# Altium footprint library Module.PcbLib: 88 footprints (part 6 of 6)
Each footprint in its own frame and in the unit in brackets; x right, y up, seen from the top. Pads: shape width x height; smd on the part's side, far side on the other; paste and mask are expansions set on the pad; w line width, h text height; cw(c..) or ccw(c..) is an arc to the next point about the centre after c.
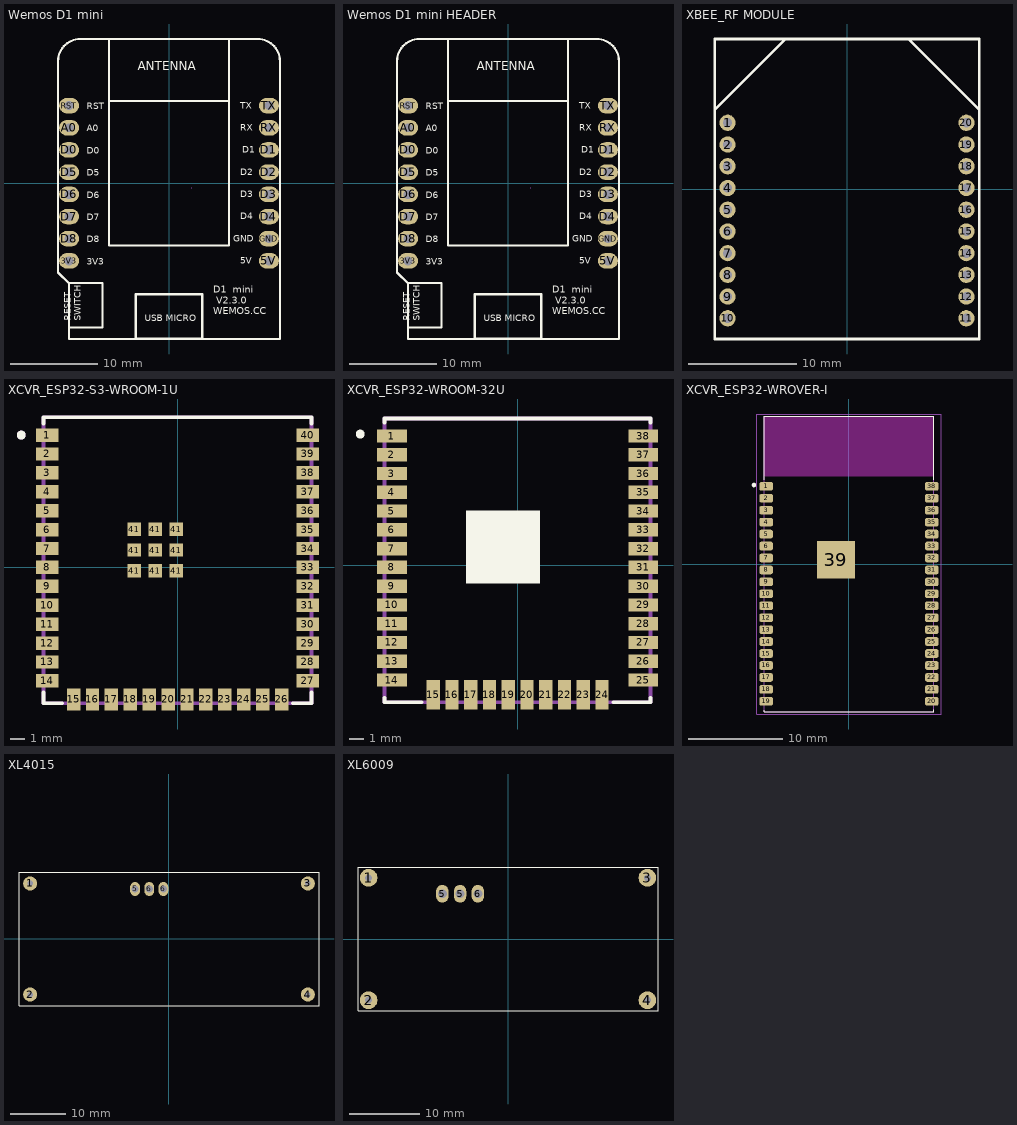
[diagram p5: the footprints below, top view; thin cyan lines are the x and y axes]

## Wemos D1 mini [mil]
pads (16):
  oval 90x70 hole 40: 3V3(-450,-350) 5V(450,-350) A0(-450,250) D0(-450,150) D1(450,150) D2(450,50) D3(450,-50) D4(450,-150) D5(-450,50) D6(-450,-50) D7(-450,-150) D8(-450,-250) GND(450,-250) RST(-450,350) RX(450,250) TX(450,350)
Top Overlay:
  lines w10: -500,548.2 -500,-401.8 -450,-451.8 -450,-701.8 500,-701.8 500,548.2 ; -500,550 cw(c-400,550) -400,650 400,650 cw(c400,550) 500,550 ; -270,650 -270,370 ; 270,650 270,370 ; -270,370 -270,-280 270,-280 270,370 ; -270,370 270,370 ; -450,-650 -300,-650 -300,-450 -450,-450 -450,-650 ; -150,-700 -150,-500 150,-500 150,-700 -150,-700
  text "RESET / SWITCH" at -398.58,-619.98 h30
  text "USB MICRO" at -110,-621.4 h30
  text "ANTENNA" at -140,508.2 h40
  text "TX" at 320,336.8 h30
  text "RX" at 320,236.8 h30
  text "D1" at 330,136.8 h30
  text "D2" at 320,36.8 h30
  text "D3" at 320,-63.2 h30
  text "D4" at 320,-163.2 h30
  text "GND" at 290,-263.2 h30
  text "5V" at 320,-363.2 h30
  text "3V3" at -370,-366.8 h30
  text "D8" at -370,-266.8 h30
  text "D7" at -370,-166.8 h30
  text "D6" at -370,-66.8 h30
  text "D5" at -370,33.2 h30
  text "D0" at -370,133.2 h30
  text "A0" at -370,233.2 h30
  text "RST" at -370,333.2 h30
  text "D1  mini /  V2.3.0 / WEMOS.CC" at 200,-590 h32
Top Designator:
  text ".Designator" at -146.1,-54.29 h60
Mechanical 15:
  lines w0.1: 101.6,-21.9 103.6,-19.9
3D body "User Library-WeMos.STEP": height 231.91, standoff -239.82, extent -500,-736.49 496.07,618.5

## Wemos D1 mini HEADER [mil]
pads (16):
  oval 90x70 hole 40: 3V3(-450,-350) 5V(450,-350) A0(-450,250) D0(-450,150) D1(450,150) D2(450,50) D3(450,-50) D4(450,-150) D5(-450,50) D6(-450,-50) D7(-450,-150) D8(-450,-250) GND(450,-250) RST(-450,350) RX(450,250) TX(450,350)
Top Overlay:
  lines w10: -500,548.2 -500,-401.8 -450,-451.8 -450,-701.8 500,-701.8 500,548.2 ; -500,550 cw(c-400,550) -400,650 400,650 cw(c400,550) 500,550 ; -270,650 -270,370 ; 270,650 270,370 ; -270,370 -270,-280 270,-280 270,370 ; -270,370 270,370 ; -450,-650 -300,-650 -300,-450 -450,-450 -450,-650 ; -150,-700 -150,-500 150,-500 150,-700 -150,-700
  text "RESET / SWITCH" at -398.58,-619.98 h30
  text "USB MICRO" at -110,-621.4 h30
  text "ANTENNA" at -140,508.2 h40
  text "TX" at 320,336.8 h30
  text "RX" at 320,236.8 h30
  text "D1" at 330,136.8 h30
  text "D2" at 320,36.8 h30
  text "D3" at 320,-63.2 h30
  text "D4" at 320,-163.2 h30
  text "GND" at 290,-263.2 h30
  text "5V" at 320,-363.2 h30
  text "3V3" at -370,-366.8 h30
  text "D8" at -370,-266.8 h30
  text "D7" at -370,-166.8 h30
  text "D6" at -370,-66.8 h30
  text "D5" at -370,33.2 h30
  text "D0" at -370,133.2 h30
  text "A0" at -370,233.2 h30
  text "RST" at -370,333.2 h30
  text "D1  mini /  V2.3.0 / WEMOS.CC" at 200,-590 h32
Top Designator:
  text ".Designator" at -146.1,-54.3 h60
Mechanical 15:
  lines w0.1: 101.6,-21.9 103.6,-19.9
3D body "User Library-WeMos.STEP": height 546.87, standoff 75.14, extent -502,-736.49 494.07,618.5
3D body "61300411821.stp": height 335.04, standoff -121.65, extent -499.22,-9.84 -400.79,409.85
3D body "61300411821.stp": height 335.04, standoff -121.65, extent 400.78,-9.84 499.21,409.85
3D body "61300411821.stp": height 335.04, standoff -121.65, extent 400.78,-409.84 499.21,9.85
3D body "61300411821.stp": height 335.04, standoff -121.65, extent -499.22,-409.84 -400.79,9.85

## XBEE_RF MODULE [mm]
pads (20):
  round 1.5 hole 0.85: 1(-10.998,6.096) 2(-10.998,4.095) 3(-10.998,2.094) 4(-10.998,0.093) 5(-10.998,-1.908) 6(-10.998,-3.909) 7(-10.998,-5.91) 8(-10.998,-7.911) 9(-10.998,-9.912) 10(-10.998,-11.913) 11(10.998,-11.913) 12(10.998,-9.912) 13(10.998,-7.911) 14(10.998,-5.91) 15(10.998,-3.909) 16(10.998,-1.908) 17(10.998,0.093) 18(10.998,2.094) 19(10.998,4.095) 20(10.998,6.096)
Top Overlay:
  lines w0.254: -12.192,7.29 -5.664,13.818 ; 5.664,13.818 12.192,7.29 ; -12.192,-13.818 -12.192,13.818 12.192,13.818 12.192,-13.818 -12.192,-13.818
Top Designator:
  text ".Designator" at -3.696,-0.372 h1.52
3D body "XBee Chip.STEP": height 12, standoff 4.5, extent -12.268,-14.001 12.232,13.899
3D body "61300211821.stp": height 11.61, standoff 0.01, extent -12.147,1.422 -9.647,7.002
3D body "61300211821.stp": height 11.61, standoff 0.01, extent -12.147,-2.58 -9.647,3
3D body "61300211821.stp": height 11.61, standoff 0.01, extent -12.147,-6.582 -9.647,-1.002
3D body "61300211821.stp": height 11.61, standoff 0.01, extent -12.147,-8.582 -9.647,-3.002
3D body "61300211821.stp": height 11.61, standoff 0.01, extent -12.147,-10.583 -9.647,-5.003
3D body "61300211821.stp": height 11.61, standoff 0.01, extent -12.147,-12.584 -9.647,-7.004
3D body "61300211821.stp": height 11.61, standoff 0.01, extent 9.85,1.422 12.35,7.002
3D body "61300211821.stp": height 11.61, standoff 0.01, extent 9.85,-2.58 12.35,3
3D body "61300211821.stp": height 11.61, standoff 0.01, extent 9.85,-6.582 12.35,-1.002
3D body "61300211821.stp": height 11.61, standoff 0.01, extent 9.85,-10.583 12.35,-5.003
3D body "61300211821.stp": height 11.61, standoff 0.01, extent 9.85,-12.584 12.35,-7.004

## XCVR_ESP32-S3-WROOM-1U [mm]
height 3.35
pads (49):
  rect 1.5x0.9 smd mask+0.05: 1(-8.75,8.88) 2(-8.75,7.61) 3(-8.75,6.34) 4(-8.75,5.07) 5(-8.75,3.8) 6(-8.75,2.53) 7(-8.75,1.26) 8(-8.75,-0.01) 9(-8.75,-1.28) 10(-8.75,-2.55) 11(-8.75,-3.82) 12(-8.75,-5.09) 13(-8.75,-6.36) 14(-8.75,-7.63) 27(8.75,-7.63) 28(8.75,-6.36) 29(8.75,-5.09) 30(8.75,-3.82) 31(8.75,-2.55) 32(8.75,-1.28) 33(8.75,-0.01) 34(8.75,1.26) 35(8.75,2.53) 36(8.75,3.8) 37(8.75,5.07) 38(8.75,6.34) 39(8.75,7.61) 40(8.75,8.88)
  rect 0.9x1.5 smd mask+0.05: 15(-6.985,-8.88) 16(-5.715,-8.88) 17(-4.445,-8.88) 18(-3.175,-8.88) 19(-1.905,-8.88) 20(-0.635,-8.88) 21(0.635,-8.88) 22(1.905,-8.88) 23(3.175,-8.88) 24(4.445,-8.88) 25(5.715,-8.88) 26(6.985,-8.88)
  rect 0.9x0.9 smd mask+0.05: 41(-2.9,-0.24) 41(-2.9,1.16) 41(-2.9,2.56) 41(-1.5,-0.24) 41(-1.5,1.16) 41(-1.5,2.56) 41(-0.1,-0.24) 41(-0.1,1.16) 41(-0.1,2.56)
Top Overlay:
  circle w0.3: c-10.5,8.88 r0.15
  lines w0.254: -9,-8.4 -9,-9.13 -7.755,-9.13 ; -9,9.65 -9,10.07 9,10.07 9,9.65 ; 7.755,-9.13 9,-9.13 9,-8.4
Top Designator:
  circle w0.3: c-10.5,8.88 r0.15
  lines w0.254: -9,-9.13 9,-9.13 9,10.07 -9,10.07 -9,-9.13
  text ".Designator" at -4.869,-0.487 h2
3D body "step_temp.STEP": height 3.35, standoff 0, extent -9,-9.13 9,10.07

## XCVR_ESP32-WROOM-32U [mm]
pads (38):
  rect 2x0.9 smd: 1(-8.5,8.755) 2(-8.5,7.485) 3(-8.5,6.215) 4(-8.5,4.945) 5(-8.5,3.675) 6(-8.5,2.405) 7(-8.5,1.135) 8(-8.5,-0.135) 9(-8.5,-1.405) 10(-8.5,-2.675) 11(-8.5,-3.945) 12(-8.5,-5.215) 13(-8.5,-6.485) 14(-8.5,-7.755) 25(8.5,-7.755) 26(8.5,-6.485) 27(8.5,-5.215) 28(8.5,-3.945) 29(8.5,-2.675) 30(8.5,-1.405) 31(8.5,-0.135) 32(8.5,1.135) 33(8.5,2.405) 34(8.5,3.675) 35(8.5,4.945) 36(8.5,6.215) 37(8.5,7.485) 38(8.5,8.755)
  rect 0.9x2 smd: 15(-5.715,-8.755) 16(-4.445,-8.755) 17(-3.175,-8.755) 18(-1.905,-8.755) 19(-0.635,-8.755) 20(0.635,-8.755) 21(1.905,-8.755) 22(3.175,-8.755) 23(4.445,-8.755) 24(5.715,-8.755)
Top Overlay:
  circle w0.3: c-10.65,8.885 r0.15
  rectangle: -3.48,-1.23 1.499,3.723
  lines w0.254: -9,-8.955 -9,-9.255 -6.49,-9.255 ; -9,9.645 -9,9.945 9,9.945 9,9.645 ; 6.49,-9.255 9,-9.255 9,-8.955
Top Designator:
  lines w0.254: -9,-9.255 9,-9.255 9,9.945 -9,9.945 -9,-9.255
  text ".Designator" at -4.869,-0.452 h2
3D body "ESP32-WROOM-32U--3DModel-STEP-56544.STEP": height 3.3, standoff 0, extent -9,-9.255 9,9.945

## XCVR_ESP32-WROVER-I [mm]
pads (39):
  rrect50% 1.45x0.93 smd: 1(-8.81,8.26) 2(-8.81,6.99) 3(-8.81,5.72) 4(-8.81,4.45) 5(-8.81,3.18) 6(-8.81,1.91) 7(-8.81,0.64) 8(-8.81,-0.63) 9(-8.81,-1.9) 10(-8.81,-3.17) 11(-8.81,-4.44) 12(-8.81,-5.71) 13(-8.81,-6.98) 14(-8.81,-8.25) 15(-8.81,-9.52) 16(-8.81,-10.79) 17(-8.81,-12.06) 18(-8.81,-13.33) 19(-8.81,-14.6) 20(8.81,-14.6) 21(8.81,-13.33) 22(8.81,-12.06) 23(8.81,-10.79) 24(8.81,-9.52) 25(8.81,-8.25) 26(8.81,-6.98) 27(8.81,-5.71) 28(8.81,-4.44) 29(8.81,-3.17) 30(8.81,-1.9) 31(8.81,-0.63) 32(8.81,0.64) 33(8.81,1.91) 34(8.81,3.18) 35(8.81,4.45) 36(8.81,5.72) 37(8.81,6.99) 38(8.81,8.26)
  rect 4x4 smd paste-0.733: 39(-1.38,0.47)
Top Overlay:
  circle w0.24: c-10.1,8.4 r0.12
  lines w0.127: -9,-15.55 -9,-15.7 9,-15.7 9,-15.5 ; -9,8.95 -9,15.7 9,15.7 9,8.95
Keep-Out Layer:
  region: 9,9.33 -9.029,9.33 -9.029,15.7 9,15.7
  region: 9,9.331 -9.03,9.331 -9.03,15.7 9,15.7
Top Designator:
  text ".Designator" at -3.968,-0.278 h1.52
Mechanical 13:
  lines w0.127: -9,-15.7 9,-15.7 9,15.7 -9,15.7 -9,-15.7
Mechanical 15:
  lines w0.05: -9.8,-15.95 9.8,-15.95 9.8,15.95 -9.8,15.95 -9.8,-15.95
3D body "ESP32-WROVER-I--3DModel-STEP-56544.STEP": height 3.65, standoff 0, extent -8.975,-15.294 9.025,16.106

## XL4015 [mm]
pads (7):
  round 2.54 hole 1: 1(-25,10) 2(-25,-10) 3(25,10) 4(25,-10)
  oval 1.778x2.54 hole 1.27: 5(-6.1,9) 6(-3.56,9) 6(-1.02,9)
Top Overlay:
  lines w0.178: -27,-12 -27,12 27,12 27,-12 -27,-12
Top Designator:
  text ".Designator" at -3.711,-0.344 h1.52
3D body "XL4015_MODELO_PISTAS.step": height 14.68, standoff -0.08, extent -27.05,-11.979 26.95,12.035

## XL6009 [mil] "MODULE"
pads (7):
  round 100 hole 39.37: 1(-785,345) 2(-785,-345) 3(785,345) 4(785,-345)
  oval 70x100 hole 50: 5(-370,255) 5(-270,255) 6(-170,255)
Top Overlay:
  lines w7: -845,-405 -845,405 845,405 845,-405 -844.06,-405
Top Designator:
  text ".Designator" at -146.1,-13.55 h60
3D body "XL6009.stp": height 501.93, standoff -205.07, extent -850,-415 850,415